# Altium integrated library 1-776163-1.IntLib: 1 symbol
Pins are listed as number, name and electrical type; pins without a type are passive.

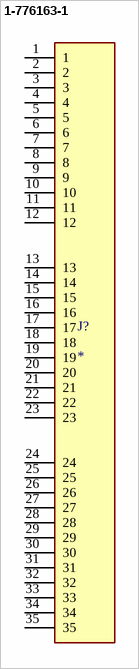
[diagram p0: symbol 1-776163-1]

## 1-776163-1
designator J?
AMPSEAL Series, 35 Way Through Hole Plug Power Conn, with Solder Termination | TE Connectivity 1-776163-1; SnapEDA_Link: https://www.snapeda.com/parts/1-776163-1/TE+Connectivity+AMP+Connectors/view-part/?ref=snap; Package: None; Value: *; MF: TE Connectivity; MP: 1-776163-1; EU_RoHS_Compliance: Compliant; Check_prices: https://www.snapeda.com/parts/1-776163-1/TE+Connectivity+AMP+Connectors/view-part/?ref=eda
footprint TE_1-776163-1
pins: 1, 2, 3, 4, 5, 6, 7, 8, 9, 10, 11, 12, 13, 14, 15, 16, 17, 18, 19, 20, 21, 22, 23, 24, 25, 26, 27, 28, 29, 30, 31, 32, 33, 34, 35